# Altium footprint library 2020-05-17_09-23-59.PcbLib: 3 footprints
Each footprint in its own frame and in the unit in brackets; x right, y up, seen from the top. Pads: shape width x height; smd on the part's side, far side on the other; paste and mask are expansions set on the pad; w line width, h text height; cw(c..) or ccw(c..) is an arc to the next point about the centre after c.
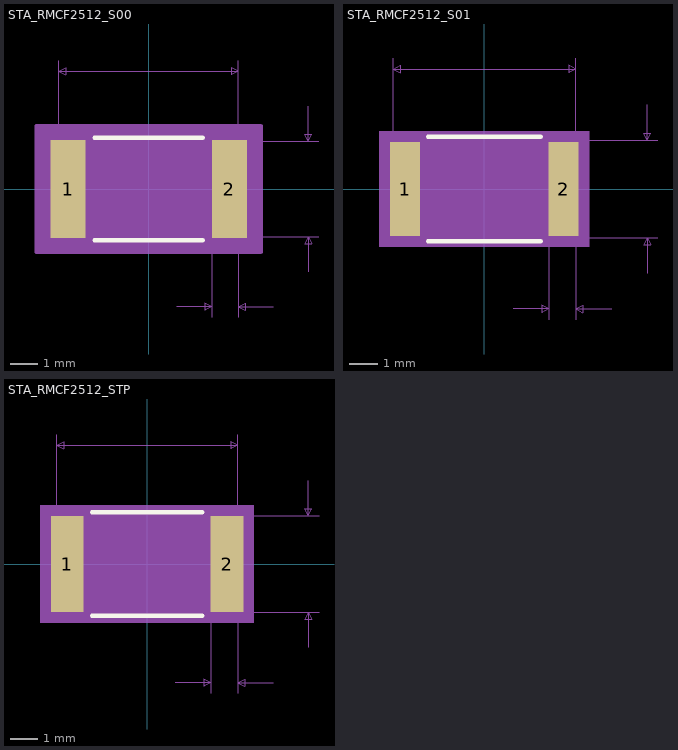
[diagram p0: the footprints below, top view; thin cyan lines are the x and y axes]

## STA_RMCF2512_S00 [mil]
pads (2):
  rect 50x140 smd paste+0 mask+0: 1(-115,0) 2(115,0)
Top Overlay:
  lines w6: -77.25,-73 77.25,-73 ; -77.25,73 77.25,73
Mechanical 5:
  region: 155,-85 -155,-85 -155,85 155,85
Mechanical 7:
  lines w1: -128,0 -128,183 ; 0,-68 243,-68 ; 0,68 243,68 ; 40,-168 90,-168 ; 90,-183 90,0 ; 128,-183 128,0 128,183 ; 178,-168 128,-168 ; 228,-118 228,-68 ; 228,118 228,68 ; -128,168 128,168 ; -128,168 -118,173 -118,163 -128,168 ; 90,-168 80,-163 80,-173 90,-168 ; 128,-168 138,-163 138,-173 128,-168 ; 128,168 118,173 118,163 128,168 ; 228,-68 223,-78 233,-78 228,-68 ; 228,68 223,78 233,78 228,68
  text "Default Padstyle: RX50Y140D0T" at -362.5,-340 h50
  text "Alt 1 Padstyle: OX60Y90D30P" at -337.5,-400 h50
  text "Alt 2 Padstyle: OX90Y60D30P" at -337.5,-460 h50
  text "0.136in/3.454mm" at 248,-12.5 h25
  text "0.256in/6.502mm" at -93.75,188 h25
  text "0.038in/0.965mm" at 15.25,-213 h25
Mechanical 13:
  lines w1: -128,-68 -128,68 ; -128,-68 -90,-68 -90,68 -128,68 ; -128,-68 128,-68 ; -128,-68 -128,68 ; -128,68 128,68 ; 128,-68 90,-68 90,68 128,68 ; 128,-68 128,68 ; 128,-68 128,68
Mechanical 15:
  region: 160,-90 -160,-90 -160,90 160,90
  lines w6: -160,-90 -160,90 160,90 160,-90 -160,-90
3D body: height 10, standoff 0, extent 0,0 10,10

## STA_RMCF2512_S01 [mil]
pads (2):
  rect 42x132 smd paste+0 mask+0: 1(-111,0) 2(111,0)
Top Overlay:
  lines w6: -78.93,-73 78.93,-73 ; -78.93,73 78.93,73
Mechanical 5:
  region: 147,-81 -147,-81 -147,81 147,81
Mechanical 7:
  lines w1: -128,0 -128,183 ; 0,-68 243,-68 ; 0,68 243,68 ; 40,-168 90,-168 ; 90,-183 90,0 ; 128,-183 128,0 128,183 ; 178,-168 128,-168 ; 228,-118 228,-68 ; 228,118 228,68 ; -128,168 128,168 ; -128,168 -118,173 -118,163 -128,168 ; 90,-168 80,-163 80,-173 90,-168 ; 128,-168 138,-163 138,-173 128,-168 ; 128,168 118,173 118,163 128,168 ; 228,-68 223,-78 233,-78 228,-68 ; 228,68 223,78 233,78 228,68
  text "Default Padstyle: RX42Y132D0T" at -362.5,-336 h50
  text "Alt 1 Padstyle: OX60Y90D30P" at -337.5,-396 h50
  text "Alt 2 Padstyle: OX90Y60D30P" at -337.5,-456 h50
  text "0.136in/3.454mm" at 248,-12.5 h25
  text "0.256in/6.502mm" at -93.75,188 h25
  text "0.038in/0.965mm" at 15.25,-213 h25
Mechanical 13:
  lines w1: -128,-68 -128,68 ; -128,-68 -90,-68 -90,68 -128,68 ; -128,-68 128,-68 ; -128,-68 -128,68 ; -128,68 128,68 ; 128,-68 90,-68 90,68 128,68 ; 128,-68 128,68 ; 128,-68 128,68
Mechanical 15:
  region: 136,-70 -136,-70 -136,70 136,70
  lines w6: -136,-70 -136,70 136,70 136,-70 -136,-70
3D body: height 10, standoff 0, extent 0,0 10,10

## STA_RMCF2512_STP [mil]
pads (2):
  rect 46x136 smd paste+0 mask+0: 1(-113,0) 2(113,0)
Top Overlay:
  lines w6: -77.89,-73 77.89,-73 ; -77.89,73 77.89,73
Mechanical 5:
  region: 151,-83 -151,-83 -151,83 151,83
Mechanical 7:
  lines w1: -128,0 -128,183 ; 0,-68 243,-68 ; 0,68 243,68 ; 40,-168 90,-168 ; 90,-183 90,0 ; 128,-183 128,0 128,183 ; 178,-168 128,-168 ; 228,-118 228,-68 ; 228,118 228,68 ; -128,168 128,168 ; -128,168 -118,173 -118,163 -128,168 ; 90,-168 80,-163 80,-173 90,-168 ; 128,-168 138,-163 138,-173 128,-168 ; 128,168 118,173 118,163 128,168 ; 228,-68 223,-78 233,-78 228,-68 ; 228,68 223,78 233,78 228,68
  text "Default Padstyle: RX46Y136D0T" at -362.5,-338 h50
  text "Alt 1 Padstyle: OX60Y90D30P" at -337.5,-398 h50
  text "Alt 2 Padstyle: OX90Y60D30P" at -337.5,-458 h50
  text "0.136in/3.454mm" at 248,-12.5 h25
  text "0.256in/6.502mm" at -93.75,188 h25
  text "0.038in/0.965mm" at 15.25,-213 h25
Mechanical 13:
  lines w1: -128,-68 -128,68 ; -128,-68 -90,-68 -90,68 -128,68 ; -128,-68 128,-68 ; -128,-68 -128,68 ; -128,68 128,68 ; 128,-68 90,-68 90,68 128,68 ; 128,-68 128,68 ; 128,-68 128,68
Mechanical 15:
  region: 146,-78 -146,-78 -146,78 146,78
  lines w6: -146,-78 -146,78 146,78 146,-78 -146,-78
3D body: height 10, standoff 0, extent 0,0 10,10